# Altium footprint library NTM_Passives.PcbLib: 23 footprints (part 1 of 2)
Each footprint in its own frame and in the unit in brackets; x right, y up, seen from the top. Pads: shape width x height; smd on the part's side, far side on the other; paste and mask are expansions set on the pad; w line width, h text height; cw(c..) or ccw(c..) is an arc to the next point about the centre after c.
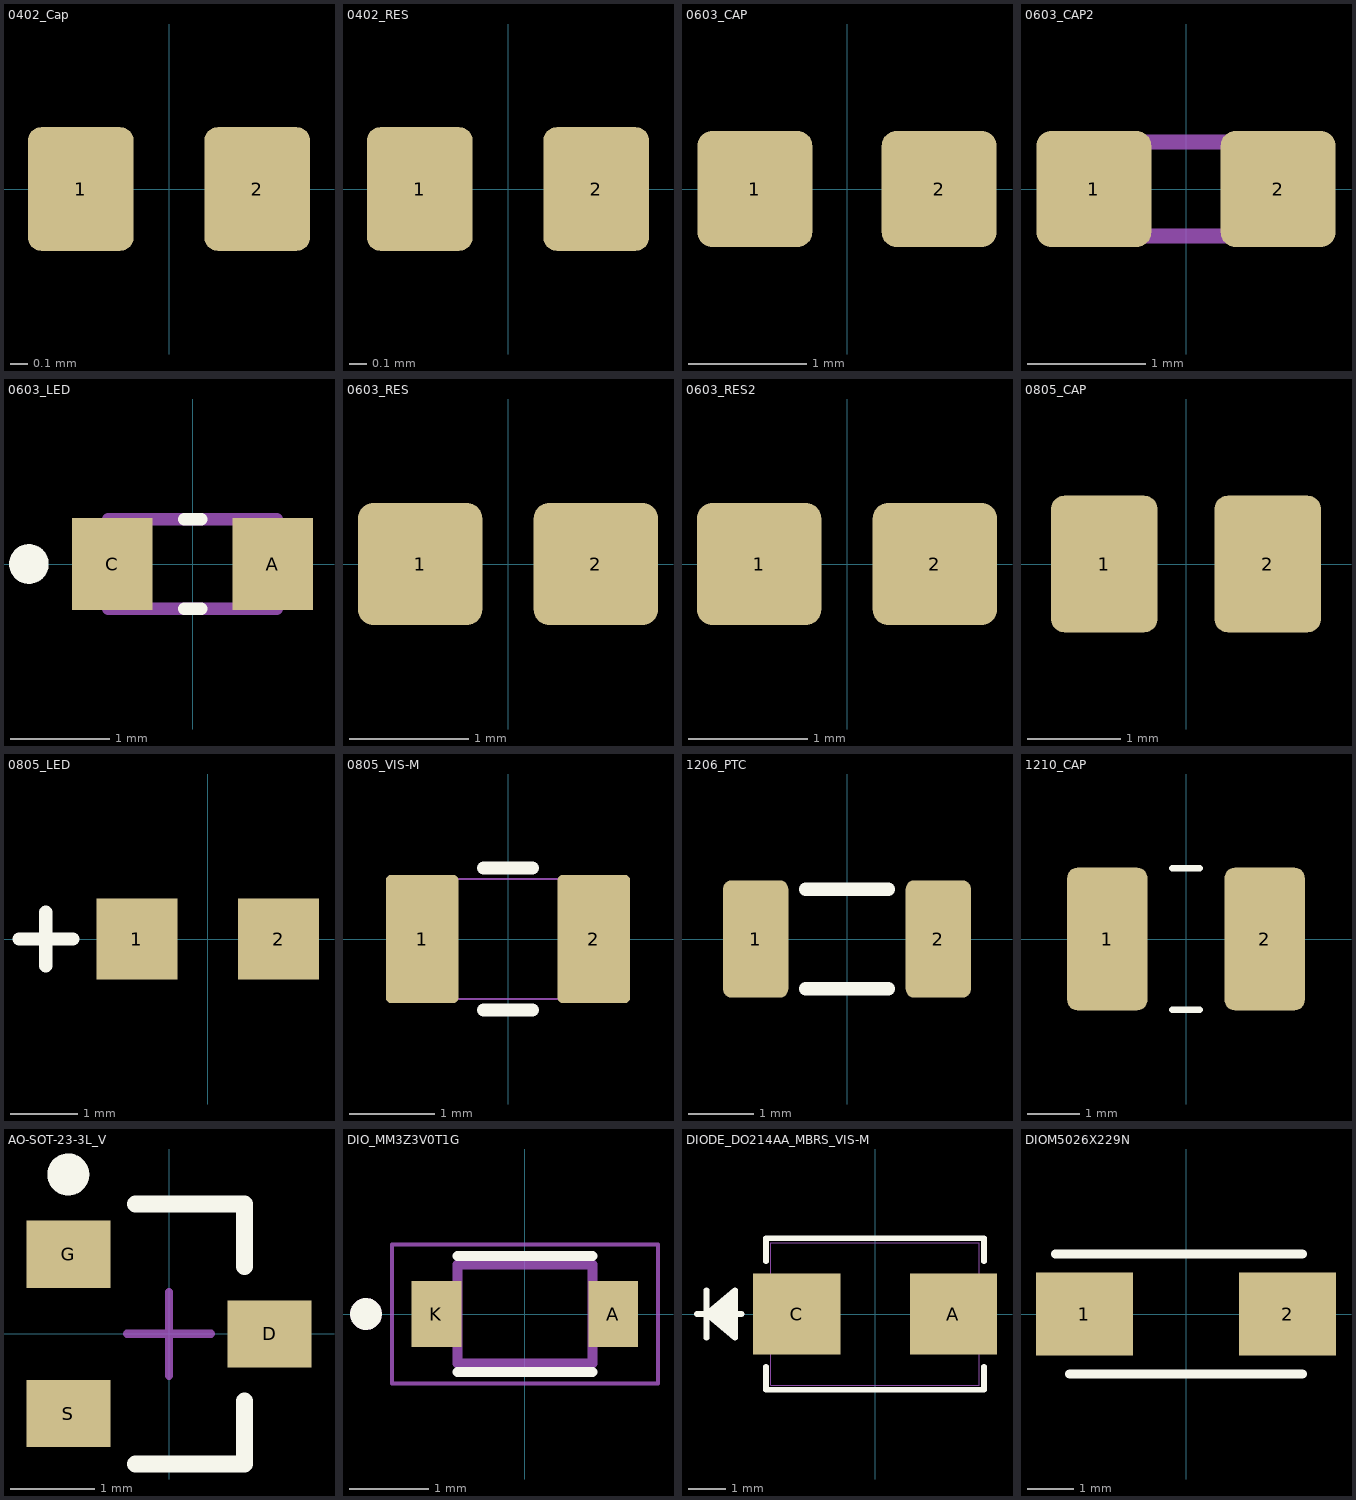
[diagram p0: the footprints below, top view; thin cyan lines are the x and y axes]

## 0402_Cap [mm]
pads (2):
  rrect25% 0.6x0.7 smd paste+0 mask+0.051: 1(-0.5,0) 2(0.5,0)
3D body "step_temp.STEP": height 0.55, standoff 0, extent -0.5,-0.25 0.5,0.25

## 0402_RES [mm]
pads (2):
  rrect25% 0.6x0.7 smd paste+0 mask+0.051: 1(-0.5,0) 2(0.5,0)
3D body "step_temp.STEP": height 0.4, standoff 0, extent -0.5,-0.25 0.5,0.25

## 0603_CAP [mm]
pads (2):
  rrect25% 0.972x0.981 smd mask+0.051: 1(-0.78,0) 2(0.78,0)
3D body "step_temp.STEP": height 0.9, standoff 0, extent -0.8,-0.4 0.8,0.4

## 0603_CAP2 [mm]
pads (2):
  rrect25% 0.972x0.981 smd mask+0.051: 1(-0.78,0) 2(0.78,0)
Top 3D Body:
  lines w0.127: -0.8,-0.4 0.8,-0.4 0.8,0.4 -0.8,0.4 -0.8,-0.4
3D body "step_temp.STEP": height 0.9, standoff 0, extent -0.8,-0.4 0.8,0.4

## 0603_LED [mm]
pads (2):
  rect 0.81x0.93 smd: A(0.81,0) C(-0.81,0)
Top Overlay:
  circle w0.2: c-1.651,0 r0.1
  lines w0.127: -0.085,-0.45 0.085,-0.45 ; -0.085,0.45 0.085,0.45
Mechanical 13:
  lines w0.127: -0.85,-0.45 -0.85,0.45 0.85,0.45 0.85,-0.45 -0.85,-0.45
3D body "KT-0603R--3DModel-STEP-269445.STEP": height 0.65, standoff 0, extent -0.8,-0.4 0.8,0.4

## 0603_RES [mm]
pads (2):
  rrect25% 1.04x1.02 smd mask+0.051: 1(-0.735,0) 2(0.735,0)
3D body "step_temp.STEP": height 0.55, standoff 0, extent -0.8,-0.4 0.8,0.4

## 0603_RES2 [mm]
pads (2):
  rrect25% 1.04x1.02 smd mask+0.051: 1(-0.735,0) 2(0.735,0)
3D body "step_temp.STEP": height 0.55, standoff 0, extent -0.8,-0.4 0.8,0.4

## 0805_CAP [mm]
pads (2):
  rrect25% 1.15x1.47 smd mask+0.051: 1(-0.88,0) 2(0.88,0)
3D body "step_temp.STEP": height 1.45, standoff 0, extent -1,-0.625 1,0.625

## 0805_LED [mm]
pads (2):
  rect 1.2x1.2 smd: 1(-1.05,0) 2(1.05,0)
Top Overlay:
  lines w0.2: -2.8,0 -2,0 ; -2.4,-0.4 -2.4,0.4
3D body: height 0.8, standoff 0, extent -1,-0.65 1,0.65

## 0805_VIS-M [mm]
pads (2):
  rrect15% 0.85x1.5 smd paste+0 mask+0.051: 1(-1.002,0) 2(1.002,0)
Top Overlay:
  lines w0.152: -0.283,-0.827 0.283,-0.827 ; -0.283,0.827 0.283,0.827
Mechanical 13:
  lines w0.025: -1.1,-0.7 -1.1,0.7 ; -1.1,-0.7 1.1,-0.7 ; -1.1,-0.7 -0.6,-0.7 -0.6,0.7 -1.1,0.7 ; -1.1,-0.7 -1.1,0.7 ; -1.1,0.7 1.1,0.7 ; 1.1,-0.7 1.1,0.7 ; 1.1,-0.7 1.1,0.7 ; 1.1,-0.7 0.6,-0.7 0.6,0.7 1.1,0.7
3D body "0805_VIS.step": height 0.84, standoff 0, extent -1.1,-0.7 1.1,0.7

## 1206_PTC [mm]
pads (2):
  rrect25% 1x1.8 smd mask+0.051: 1(-1.4,0) 2(1.4,0)
Top Overlay:
  lines w0.203: -0.635,-0.762 0.635,-0.762 ; -0.635,0.762 0.635,0.762
3D body "step_temp.STEP": height 0.75, standoff 0, extent -1.6,-0.8 1.6,0.8

## 1210_CAP [mm]
pads (2):
  rrect25% 1.53x2.72 smd paste+0 mask+0.102: 1(-1.5,0) 2(1.5,0)
Top Overlay:
  lines w0.127: -0.26,-1.35 0.26,-1.35 ; -0.26,1.35 0.26,1.35
3D body "step_temp.STEP": height 2.7, standoff 0, extent -1.6,-1.25 1.6,1.25

## AO-SOT-23-3L_V [mm] "SOT23, 3-Leads, Body 3.1x1.8mm, Pitch 0.95mm"
height 1.25
pads (3):
  rect 1x0.8 smd mask+0.051: D(1.2,0) G(-1.2,0.95) S(-1.2,-0.95)
Top Overlay:
  circle w0.25: c-1.2,1.9 r0.125
  lines w0.2: -0.4,-1.55 0.9,-1.55 0.9,-0.8 ; -0.4,1.55 0.9,1.55 0.9,0.8
Mechanical 15:
  lines w0.1: -0.5,0 0.5,0 ; 0,-0.5 0,0.5
3D body "AO3401A.STEP": height 1.25, standoff 0, extent -1.4,-1.45 1.4,1.45

## DIO_MM3Z3V0T1G [mm]
pads (2):
  rect 0.625x0.83 smd mask+0.051: A(1.112,0) K(-1.112,0)
Top Overlay:
  circle w0.2: c-2,0 r0.1
  lines w0.127: -0.85,-0.728 0.85,-0.728 ; -0.85,0.728 0.85,0.728
Mechanical 13:
  circle w0.2: c-2,0 r0.1
  lines w0.127: -0.85,-0.625 -0.85,0.625 0.85,0.625 0.85,-0.625 -0.85,-0.625
Mechanical 15:
  lines w0.05: -1.675,-0.875 -1.675,0.875 1.675,0.875 1.675,-0.875 -1.675,-0.875
3D body "step_temp.STEP": height 1, standoff 0, extent -1.25,-0.619 1.25,0.619

## DIODE_DO214AA_MBRS_VIS-M [mil]
pads (2):
  rect 92x85 smd paste+0 mask+2: A(82.68,0) C(-82.68,0)
Top Overlay:
  lines w6: -187.87,0 -140.97,0 ; -177.87,-25 -177.87,25 ; -147.87,-20 -177.87,0 ; -147.87,-15 -177.87,0 ; -147.87,-10 -177.87,0 ; -147.87,-5 -177.87,0 ; -147.87,5 -177.87,0 ; -147.87,10 -177.87,0 ; -147.87,15 -177.87,0 ; -147.87,20 -177.87,0 ; -115,-55.6 -115,-80 115,-80 115,-55.6 ; -115,55.6 -115,80 115,80 115,55.6 ; -177.87,0 -147.87,-25 -147.87,25 -177.87,0
Mechanical 13:
  lines w1: -187.87,0 -137.87,0 ; -177.87,-25 -177.87,25 ; -147.87,-20 -177.87,0 ; -147.87,-15 -177.87,0 ; -147.87,-10 -177.87,0 ; -147.87,-5 -177.87,0 ; -147.87,5 -177.87,0 ; -147.87,10 -177.87,0 ; -147.87,15 -177.87,0 ; -147.87,20 -177.87,0 ; -177.87,0 -147.87,-25 -147.87,25 -177.87,0 ; -110,-75 -110,75 110,75 110,-75 -110,-75
3D body "DIODE_DO214AA_MBRS_VIS.step": height 95.98, standoff 0, extent -110,-75 110,75

## DIOM5026X229N [mm]
pads (2):
  rect 2.1x1.8 smd paste+0 mask+0.102: 1(-2.2,0) 2(2.2,0)
Top Overlay:
  lines w0.2: -2.825,1.298 2.52,1.298 ; -2.52,-1.298 2.52,-1.298
3D body "step_temp.STEP": height 2.4, standoff 0, extent -2.605,-1.302 2.605,1.302